# Altium footprint library Diodos.PcbLib: 13 footprints
Each footprint in its own frame and in the unit in brackets; x right, y up, seen from the top. Pads: shape width x height; smd on the part's side, far side on the other; paste and mask are expansions set on the pad; w line width, h text height; cw(c..) or ccw(c..) is an arc to the next point about the centre after c.
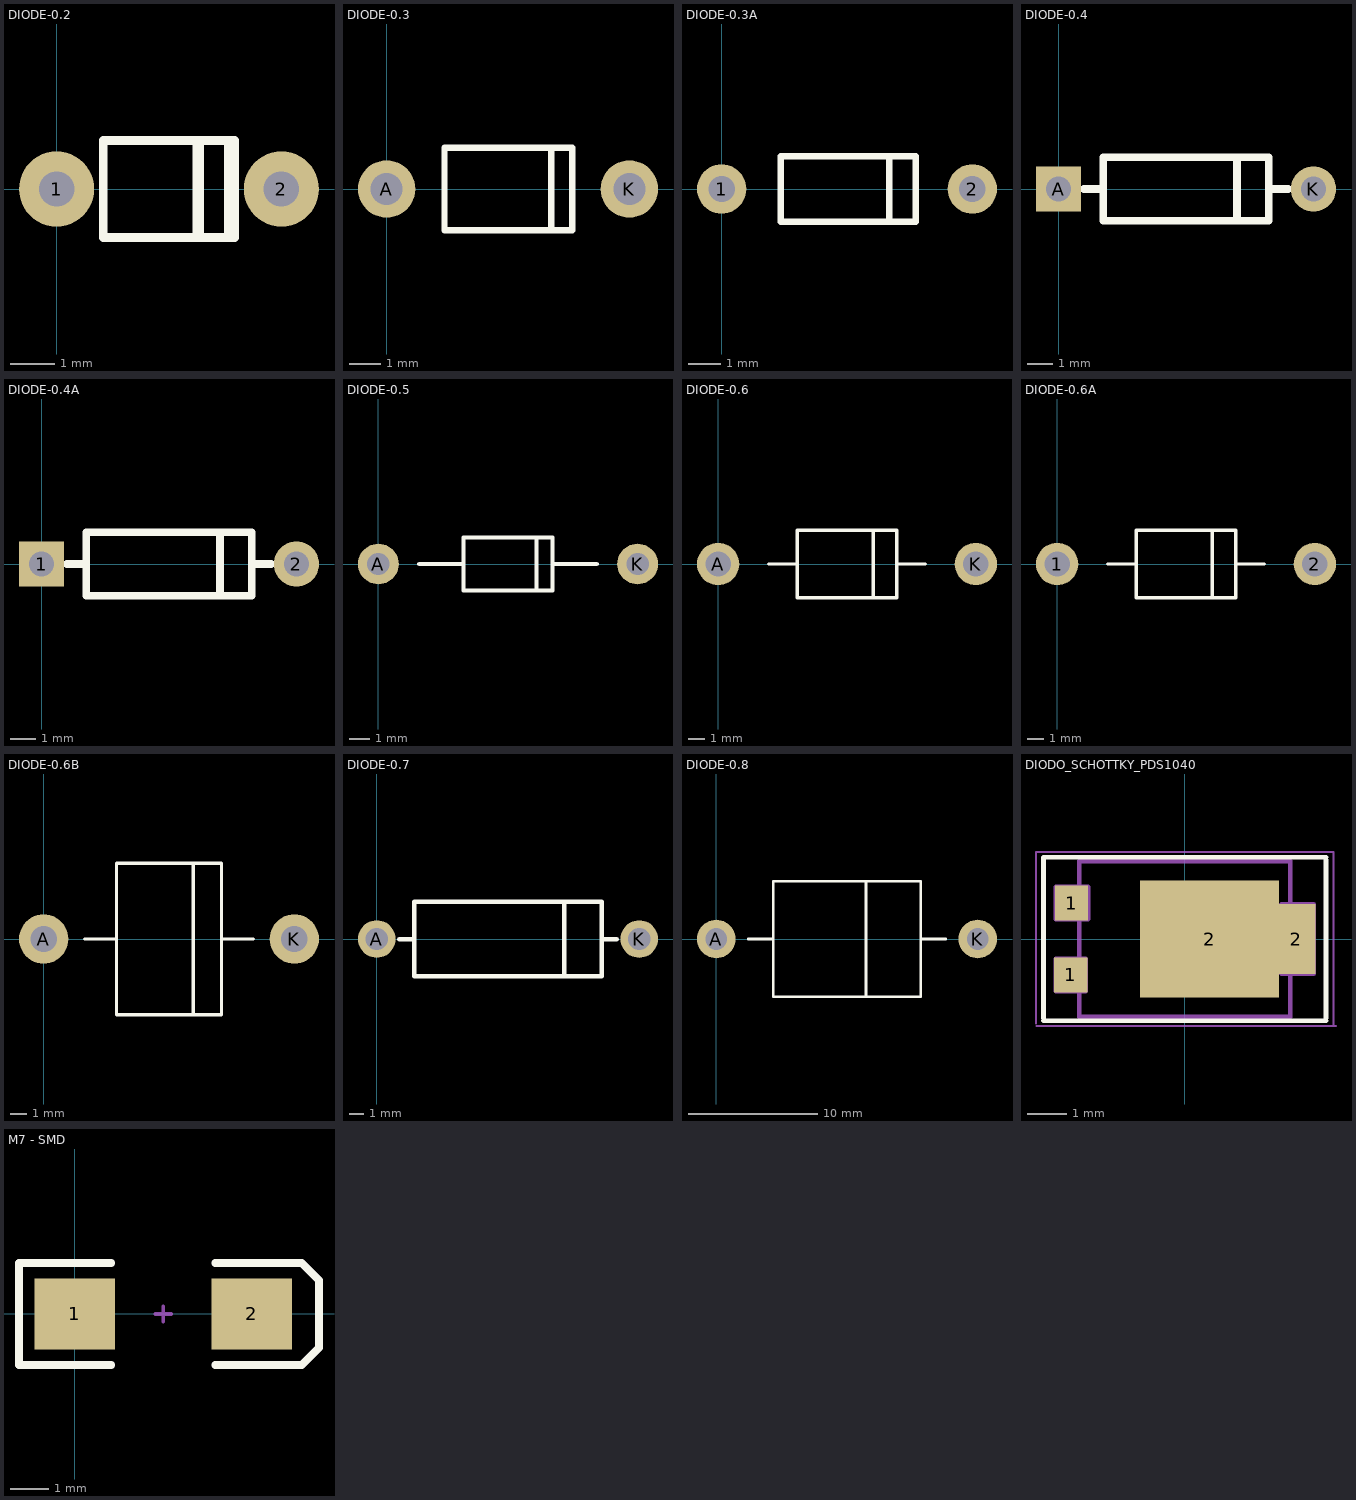
[diagram p0: the footprints below, top view; thin cyan lines are the x and y axes]

## DIODE-0.2 [mm]
pads (2):
  round 1.7 hole 0.8: 1(0,0) 2(5.08,0)
Top Overlay:
  lines w0.2: 3.882,-1.1 3.882,1.1 ; 1.055,-1.1 4.025,-1.1 4.025,0 4.025,1.1 1.055,1.1 1.055,-1.1
  lines w0.254: 3.2,-1 3.2,1.04

## DIODE-0.3 [mm]
pads (2):
  round 1.8 hole 1: A(0,0) K(7.62,0)
Top Overlay:
  lines w0.2: 5.168,-1.3 5.168,1.3 ; 1.815,-1.3 1.815,1.3 5.83,1.3 5.825,0 5.825,-1.3 1.815,-1.3

## DIODE-0.3A [mm]
pads (2):
  round 1.5 hole 0.8: 1(0,0) 2(7.62,0)
Top Overlay:
  lines w0.2: 1.79,-1 5.9,-1 5.9,-0.1 5.9,1 1.8,1 1.8,-1 ; 5.1,-1 5.1,1

## DIODE-0.4 [mm] "1N400? A-K"
pads (2):
  rect 1.8x1.8 hole 1: A(0,0)
  round 1.8 hole 1: K(10.16,0)
Top Overlay:
  lines w0.305: 1.016,0 1.778,0 ; 7.112,-1.27 7.112,1.27 ; 8.382,0 9.144,0 ; 1.778,-1.27 8.382,-1.27 8.382,1.27 1.778,1.27 1.778,-1.27
3D body "do-case59-10.step": height 2.35, standoff -3.57, extent -0.879,-1.175 11.039,1.175

## DIODE-0.4A [mm] "1N400? 1-2"
pads (2):
  rect 1.8x1.8 hole 1: 1(0,0)
  round 1.8 hole 1: 2(10.16,0)
Top Overlay:
  lines w0.305: 1.016,0 1.778,0 ; 7.112,-1.27 7.112,1.27 ; 8.382,0 9.144,0 ; 1.778,-1.27 8.382,-1.27 8.382,1.27 1.778,1.27 1.778,-1.27
3D body "do-case59-10.step": height 2.35, standoff -3.57, extent -0.879,-1.175 11.039,1.175

## DIODE-0.5 [mm]
pads (2):
  round 2 hole 1.1: A(0,0) K(12.7,0)
Top Overlay:
  lines w0.2: 2,0 4.175,0 ; 7.742,-1.3 7.742,1.3 ; 8.525,0 10.7,0 ; 4.175,0 4.175,-1.3 8.525,-1.3 8.525,1.3 4.175,1.3 4.175,0

## DIODE-0.6 [mm]
pads (2):
  round 2.5 hole 1.5: A(0,0) K(15.24,0)
Top Overlay:
  lines w0.2: 3,0 4.675,0 ; 9.178,-2 9.178,2 ; 10.565,0 12.24,0 ; 4.675,0 4.675,-2 10.565,-2 10.565,2 4.675,2 4.675,0

## DIODE-0.6A [mm]
pads (2):
  round 2.5 hole 1.5: 1(0,0) 2(15.24,0)
Top Overlay:
  lines w0.2: 3,0 4.675,0 ; 9.178,-2 9.178,2 ; 10.565,0 12.24,0 ; 4.675,0 4.675,-2 10.565,-2 10.565,2 4.675,2 4.675,0

## DIODE-0.6B [mm]
pads (2):
  round 3 hole 1.6: A(0,0) K(15.24,0)
Top Overlay:
  lines w0.2: 2.5,0 4.425,0 ; 9.095,-4.6 9.095,4.6 ; 10.815,0 12.74,0 ; 4.425,0 4.425,-4.6 10.815,-4.6 10.815,4.6 4.425,4.6 4.425,0

## DIODE-0.7 [mm]
pads (2):
  round 2.54 hole 1.5: A(0,0) K(17.78,0)
Top Overlay:
  lines w0.305: 1.524,0 2.54,0 ; 12.7,-2.54 12.7,2.54 ; 15.24,0 16.256,0 ; 2.54,-2.54 2.54,2.54 15.24,2.54 15.24,-2.54 2.54,-2.54

## DIODE-0.8 [mm]
pads (2):
  round 3 hole 1.7: A(0,0) K(20.32,0)
Top Overlay:
  lines w0.2: 2.5,0 4.425,0 ; 11.635,-4.5 11.635,4.5 ; 15.895,0 17.82,0 ; 4.425,0 4.425,-4.5 15.895,-4.5 15.895,4.5 4.425,4.5 4.425,0

## DIODO_SCHOTTKY_PDS1040 [mm]
pads (4):
  rect 0.85x0.9 smd: 1(-2.92,-0.92) 1(-2.9,0.92)
  rect 3.55x3 smd: 2(0.635,0)
  rect 0.99x1.8 smd: 2(2.857,0)
Top Overlay:
  lines w0.12: -3.619,-2.095 3.619,-2.095 ; -3.619,-2.032 -3.619,2.095 3.619,2.095 ; 3.619,-2.032 3.619,2.032
Mechanical 13:
  lines w0.12: 2.476,-0.889 3.302,-0.889 3.302,0.889 2.476,0.889 ; -3.302,-1.333 -2.54,-1.333 -2.54,-0.508 -3.302,-0.508 -3.302,-1.333 ; -3.302,0.508 -2.476,0.508 -2.476,1.333 -3.302,1.333 -3.302,0.508 ; -2.7,-2 2.7,-2 2.7,2 -2.7,2 -2.7,-2
Mechanical 15:
  circle w0.05: c0,0 r0.25
  lines w0.05: -3.81,-2.159 -3.81,2.222 3.81,2.222 3.81,-2.222 ; -3.795,-2.222 3.873,-2.222 ; -0.35,0 0.35,0 ; 0,-0.35 0,0.35
3D body: height 1.15, standoff 0, extent -2.699,-1.999 2.699,1.999
3D body: height 0.4, standoff 0, extent 2.701,-0.888 3.301,0.888
3D body: height 0.4, standoff 0, extent -3.301,0.509 -2.701,1.333
3D body: height 0.4, standoff 0, extent -3.301,-1.333 -2.701,-0.509

## M7 - SMD [mm]
pads (2):
  rect 2.1x1.85 smd: 1(0,0) 2(4.6,0)
Top Overlay:
  lines w0.2: 0.95,-1.325 -1.45,-1.325 -1.45,1.325 0.95,1.325 ; 3.65,-1.325 5.9,-1.325 6.35,-0.875 6.35,0.875 5.9,1.325 3.65,1.325
Mechanical 1:
  lines w0.1: 2.1,0 2.5,0 ; 2.3,-0.2 2.3,0.2